# Altium schematic symbol library NC7SZ05P5X.SchLib: 1 symbol
Pins are listed as number, name and electrical type; pins without a type are passive.

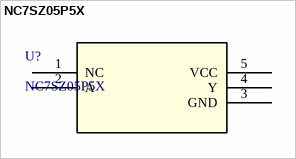
[diagram p0: symbol NC7SZ05P5X]

## NC7SZ05P5X
designator U?
Description; Manufacturer_Name: onsemi; Copyright: Copyright (C) 2026 Ultra Librarian. All rights reserved.; Manufacturer_Part_Number: NC7SZ05P5X; RefDes: RefDes; Type: Type
footprint SC-88A-5_1P35X2P2_ONS
pins: 1 NC, 2 A, 3 GND (power), 4 Y, 5 VCC (power)